# Altium schematic symbol library PRT-12790.SchLib: 1 symbol
Pins are listed as number, name and electrical type; pins without a type are passive.

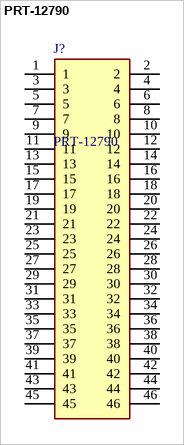
[diagram p0: symbol PRT-12790]

## PRT-12790
designator J?
SparkFun Accessories Stackable Header 2x23 Pin Female; Geometry.Height: 8.65mm; Manufacturer_Name: SparkFun; Manufacturer_Part_Number: PRT-12790; Mouser Part Number: 474-PRT-12790; Mouser Price/Stock: https://www.mouser.co.uk/ProductDetail/SparkFun/PRT-12790?qs=WyAARYrbSnZh0%252BVGZi59Ng%3D%3D; Arrow Part Number: PRT-12790; Arrow Price/Stock: https://www.arrow.com/en/products/prt-12790/sparkfun-electronics; Datasheet Link: https://cdn.sparkfun.com/datasheets/Prototyping/20218.pdf
footprint PRT12790
pins: 1, 2, 3, 4, 5, 6, 7, 8, 9, 10, 11, 12, 13, 14, 15, 16, 17, 18, 19, 20, 21, 22, 23, 24, 25, 26, 27, 28, 29, 30, 31, 32, 33, 34, 35, 36, 37, 38, 39, 40, 41, 42, 43, 44, 45, 46